# Altium schematic symbol library 1 µF, 100 V DC, 1206 (3216 metric).SchLib: 1 symbol
Pins are listed as number, name and electrical type; pins without a type are passive.

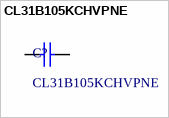
[diagram p0: symbol CL31B105KCHVPNE]

## CL31B105KCHVPNE
designator C?
1 µF, 100 V DC, 1206 (3216 metric); Supplier 1: Mouser; Supplier Part Number 1: 187-CL31B105KCHVPNE; JLCPCB Part #: C307368
footprint C_1210_3225Metric (Chip Ceramic Capacitor, 2-Leads, Body 3.20x2.50mm, IPC Medium Density, KEMET 1210 Reference)
pins: 1, 2